# Altium footprint library Miscellaneous Devices.PcbLib: 306 footprints (part 18 of 20)
Each footprint in its own frame and in the unit in brackets; x right, y up, seen from the top. Pads: shape width x height; smd on the part's side, far side on the other; paste and mask are expansions set on the pad; w line width, h text height; cw(c..) or ccw(c..) is an arc to the next point about the centre after c.
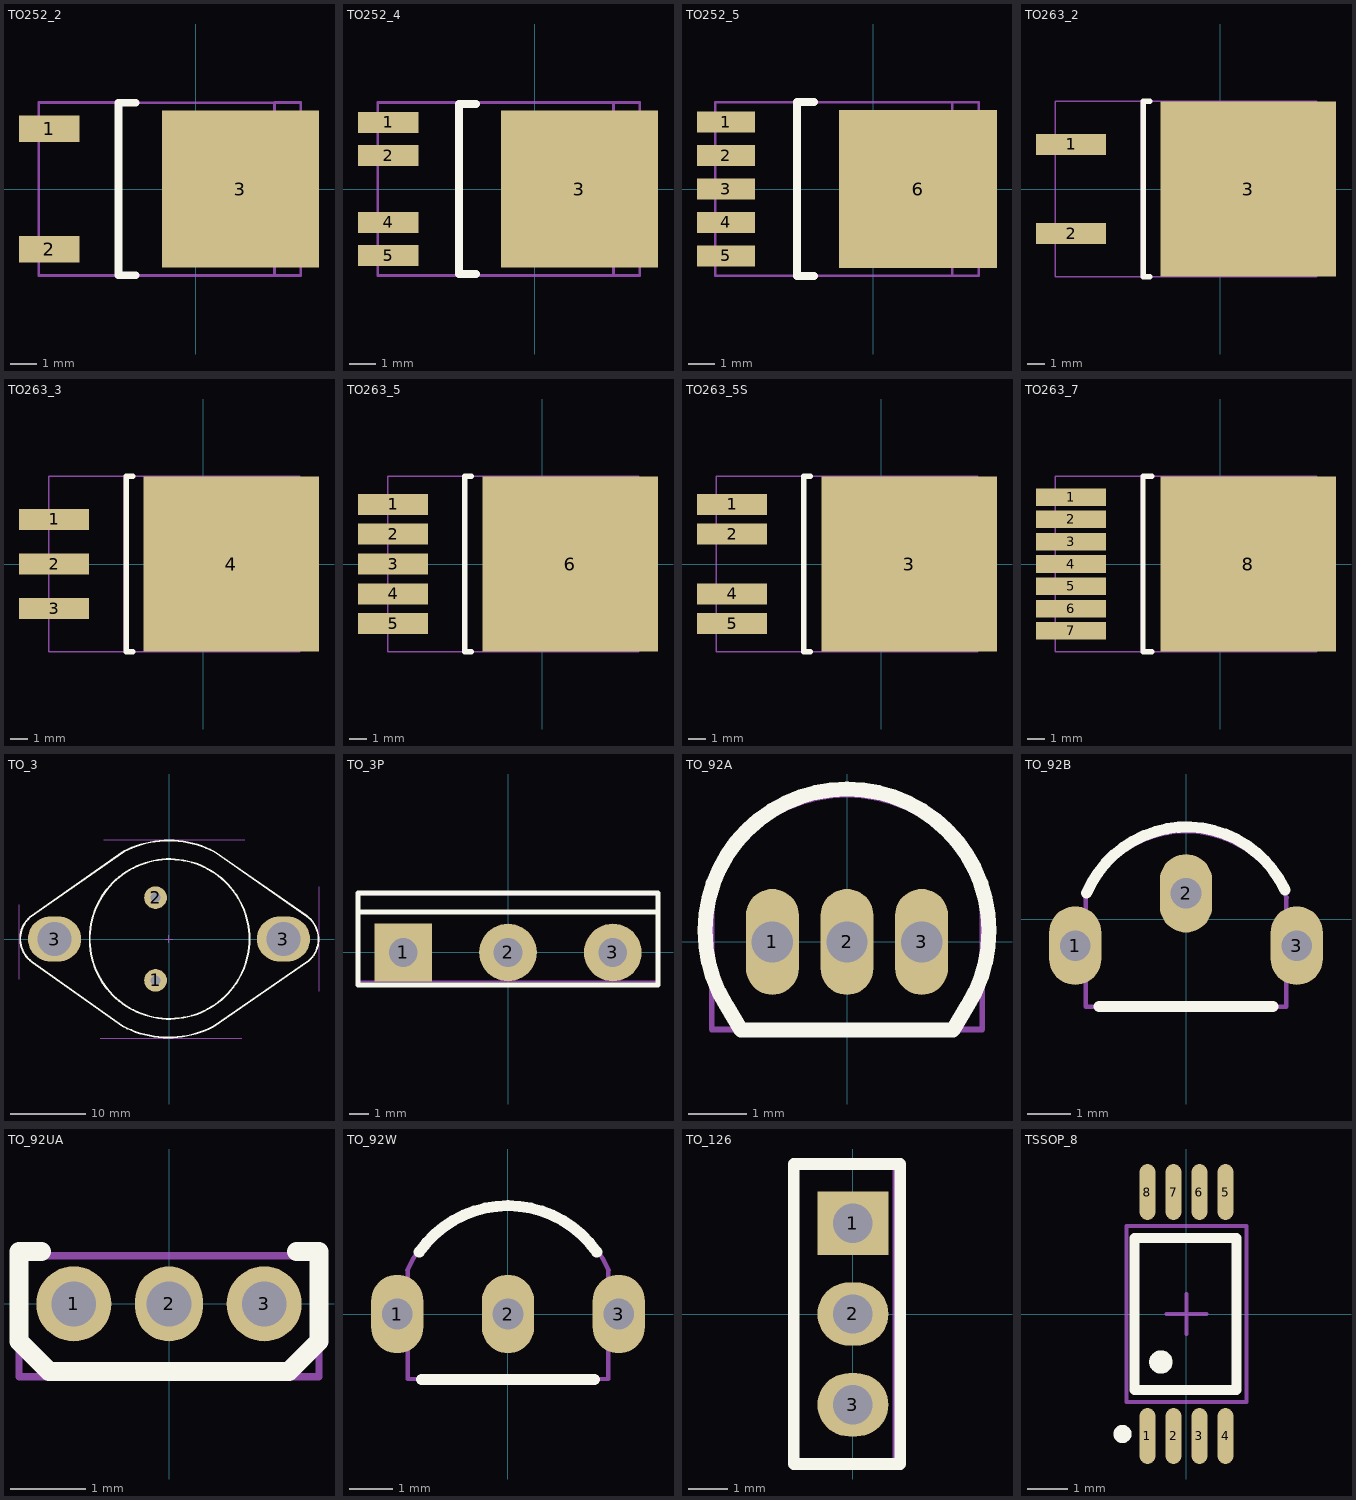
[diagram p17: the footprints below, top view; thin cyan lines are the x and y axes]

## TO252_2 [mm]
pads (3):
  rect 2.3x1 smd: 1(-5.6,2.3) 2(-5.6,-2.3)
  rect 6x6 smd: 3(1.7,0)
Top Overlay:
  lines w0.3: -2.294,-3.29 -2.95,-3.29 -2.95,3.29 -2.294,3.29
Mechanical 15:
  lines w0.1: -3,3.29 3,3.29 ; -3,-3.3 -3,3.3 -6,3.3 -6,-3.3 -3,-3.3 ; -3,-3.3 3,-3.3 ; 3,-3.3 3,3.3 4,3.3 4,-3.3 3,-3.3
3D body: height 2.3, standoff -0.01, extent -5.5,-3.29 4.2,3.29

## TO252_4 [mm]
pads (5):
  rect 2.3x0.8 smd: 1(-5.6,2.54) 2(-5.6,1.27) 4(-5.6,-1.27) 5(-5.6,-2.54)
  rect 6x6 smd: 3(1.7,0)
Top Overlay:
  lines w0.3: -2.25,-3.25 -2.9,-3.25 -2.9,3.25 -2.25,3.25
Mechanical 15:
  lines w0.1: -3,-3.3 -6,-3.3 -6,3.3 -3,3.3 ; -3,-3.3 -3,3.3 ; -3,-3.3 3,-3.3 ; -3,3.3 3,3.3 ; 3,-3.3 3,3.3 ; 3,-3.3 4,-3.3 4,3.3 3,3.3
3D body: height 2.3, standoff -0.01, extent -5.7,-3.249 4.1,3.251

## TO252_5 [mm]
pads (6):
  rect 2.2x0.8 smd: 1(-5.6,2.54) 2(-5.6,1.27) 3(-5.6,0) 4(-5.6,-1.27) 5(-5.6,-2.54)
  rect 6x6 smd: 6(1.7,0)
Top Overlay:
  lines w0.3: -2.25,-3.3 -2.9,-3.3 -2.9,3.3 -2.25,3.3
Mechanical 15:
  lines w0.1: -3,-3.3 -6,-3.3 -6,3.3 -3,3.3 ; -3,-3.3 -3,3.3 ; -3,-3.3 3,-3.3 ; -3,3.3 3,3.3 ; 3,-3.3 4,-3.3 4,3.3 3,3.3 ; 3,-3.3 3,3.3
3D body: height 2.4, standoff -0.01, extent -6.333,-3.353 4.533,3.347

## TO263_2 [mm]
pads (3):
  rect 4x1.2 smd: 1(-8.5,2.54) 2(-8.5,-2.54)
  rect 10x10 smd: 3(1.6,0)
Top Overlay:
  lines w0.3: -4.006,-5 -4.387,-5 -4.387,5 -4.006,5
Mechanical 15:
  lines w0.1: -4.5,-5 -9.4,-5 -9.4,5 -4.5,5 ; -4.5,-5 4.5,-5 ; -4.5,-5 -4.5,5 ; -4.5,5 4.5,5 ; 4.5,-5 5.5,-5 5.5,5 4.5,5 ; 4.5,-5 4.5,5
3D body: height 4.98, standoff -0.03, extent -9.4,-5.1 5.864,5.06

## TO263_3 [mm]
pads (4):
  rect 4x1.2 smd: 1(-8.5,2.54) 2(-8.5,0) 3(-8.5,-2.54)
  rect 10x10 smd: 4(1.6,0)
Top Overlay:
  lines w0.3: -4.006,-5 -4.387,-5 -4.387,5 -4.006,5
Mechanical 15:
  lines w0.1: -4.5,-5 -8.8,-5 -8.8,5 -4.5,5 ; -4.5,-5 4.5,-5 ; -4.5,-5 -4.5,5 ; -4.5,5 4.5,5 ; 4.5,-5 5.5,-5 5.5,5 4.5,5 ; 4.5,-5 4.5,5
3D body: height 4.78, standoff -0.02, extent -9.4,-5 6.27,5

## TO263_5 [mm]
pads (6):
  rect 4x1.2 smd: 1(-8.5,3.4) 2(-8.5,1.7) 3(-8.5,0) 4(-8.5,-1.7) 5(-8.5,-3.4)
  rect 10x10 smd: 6(1.6,0)
Top Overlay:
  lines w0.3: -4.029,-5 -4.41,-5 -4.41,5 -4.029,5
Mechanical 15:
  lines w0.1: -4.5,-5 -8.8,-5 -8.8,5 -4.5,5 ; -4.5,-5 4.5,-5 ; -4.5,-5 -4.5,5 ; -4.5,5 4.5,5 ; 4.5,-5 4.5,5 ; 4.5,-5 5.5,-5 5.5,5 4.5,5
3D body: height 4.78, standoff -0.02, extent -9.4,-5 6.27,5

## TO263_5S [mm]
pads (5):
  rect 4x1.2 smd: 1(-8.5,3.4) 2(-8.5,1.7) 4(-8.5,-1.7) 5(-8.5,-3.4)
  rect 10x10 smd: 3(1.6,0)
Top Overlay:
  lines w0.3: -4.029,-5 -4.41,-5 -4.41,5 -4.029,5
Mechanical 15:
  lines w0.1: -4.5,-5 -9.4,-5 -9.4,5 -4.5,5 ; -4.5,-5 4.5,-5 ; -4.5,-5 -4.5,5 ; -4.5,5 4.5,5 ; 4.5,-5 4.5,5 ; 4.5,-5 5.5,-5 5.5,5 4.5,5
3D body: height 4.78, standoff -0.02, extent -9.4,-5 6.27,5

## TO263_7 [mm]
pads (8):
  rect 4x1 smd: 1(-8.5,3.81) 2(-8.5,2.54) 3(-8.5,1.27) 4(-8.5,0) 5(-8.5,-1.27) 6(-8.5,-2.54) 7(-8.5,-3.81)
  rect 10x10 smd: 8(1.6,0)
Top Overlay:
  lines w0.3: -3.9,-5 -4.4,-5 -4.4,5 -3.9,5
Mechanical 15:
  lines w0.1: -4.5,-5 4.5,-5 ; -4.5,-5 -4.5,5 ; -4.5,-5 -9.4,-5 -9.4,5 -4.5,5 ; -4.5,5 4.5,5 ; 4.5,-5 5.5,-5 5.5,5 4.5,5 ; 4.5,-5 4.5,5
3D body: height 4.78, standoff -0.02, extent -9.4,-5 6.27,5

## TO_3 [mm]
pads (4):
  round 3 hole 1.3: 1(-1.778,-5.461) 2(-1.778,5.461)
  oval 7x6 hole 4.5: 3(-15.113,0) 3(15.113,0)
Top Overlay:
  circle w0.254: c0.076,0 r10.541
  lines w0.254: -18.363,2.871 ccw(c-15.833,0.034) -18.081,-3.032 -6.107,-11.513 ccw(c-0.069,-0.003) 5.884,-11.557 18.463,-2.871 ccw(c15.933,-0.034) 18.181,3.032 6.007,11.513 ccw(c-0.031,0.003) -5.984,11.557 -18.363,2.871
Mechanical 15:
  lines w0.1: -19.8,-5.3 -19.8,4.5 ; -9.1,-13.1 9.6,-13.1 ; -8.6,13.1 10,13.1 ; -0.5,0 0.5,0 ; 0,-0.5 0,0.5 ; 19.8,-6.9 19.8,6.9
3D body: height 8.7, standoff -2.8, extent -19.757,-13.089 19.833,13.089

## TO_3P [mm]
pads (3):
  rect 3x3 hole 1.5: 1(-5.45,0)
  round 3 hole 1.5: 2(0,0) 3(5.45,0)
Top Overlay:
  lines w0.254: -7.8,2.1 7.8,2.1 ; -7.8,-1.7 7.8,-1.7 7.8,3.1 -7.8,3.1 -7.8,-1.7
Mechanical 15:
  lines w0.1: -7.8,-1.5 7.8,-1.5 7.8,3 -7.8,3 -7.8,-1.5
3D body: height 24.9, standoff -11, extent -7.75,-1.5 7.75,3

## TO_92A [mm]
pads (3):
  oval 0.9x1.8 hole 0.7: 1(-1.27,0) 2(0,0) 3(1.27,0)
Top Overlay:
  lines w0.254: -2.052,-1.086 cw(c0,0.186) 2.052,-1.086 1.8,-1.5 -1.8,-1.5 -2.052,-1.086
Mechanical 15:
  lines w0.1: -2.3,1 -2.3,-1.49 2.3,-1.49 2.3,1 ; -2.295,0.998 cw(c0,0) 2.295,0.998
3D body: height 7, standoff -4, extent -2.421,-1.49 2.379,2.44

## TO_92B [mm]
pads (3):
  oval 1.2x1.8 hole 0.7: 1(-2.54,-0.6) 2(0,0.6) 3(2.54,-0.6)
Top Overlay:
  lines w0.254: -2.277,0.603 cw(c0.011,-0.363) 2.267,0.677 ; -2,-2 2,-2
Mechanical 15:
  lines w0.1: -2.309,0.504 cw(c0,-0.5) 2.309,0.504 ; -2.3,0.5 -2.3,-2 2.3,-2 2.3,0.5
3D body: height 7.34, standoff -0.7, extent -2.8,-2 2.88,1.8

## TO_92UA [mm]
pads (3):
  round 1 hole 0.6: 1(-1.27,0) 3(1.27,0)
  oval 0.9x1 hole 0.6: 2(0,0)
Top Overlay:
  lines w0.254: -1.7,0.7 -2,0.7 -2,-0.5 -1.6,-0.9 1.6,-0.9 2,-0.5 2,0.7 1.7,0.7
Mechanical 15:
  lines w0.1: -2,-0.97 2,-0.97 2,0.64 -2,0.64 -2,-0.97
3D body: height 5.7, standoff -7.3, extent -2,-0.97 2,0.64

## TO_92W [mm]
pads (3):
  oval 1.2x1.8 hole 0.7: 1(-2.54,0) 2(0,0) 3(2.54,0)
Top Overlay:
  lines w0.254: -2.035,1.425 cw(c0,0) 2.035,1.425 ; -1.98,-1.5 1.98,-1.5
Mechanical 15:
  lines w0.1: -2.309,1.004 cw(c0,0) 2.309,1.004 ; -2.3,1 -2.3,-1.49 2.3,-1.49 2.3,1
3D body: height 6.7, standoff -4.6, extent -2.73,-1.539 2.8,2.539

## TO_126 [mm]
pads (3):
  rect 1.8x1.6 hole 1: 1(0,2.3)
  oval 1.8x1.6 hole 1: 2(0,0) 3(0,-2.3)
Top Overlay:
  lines w0.3: -1.5,-3.8 1.2,-3.8 1.2,3.8 -1.5,3.8 -1.5,-3.8
Mechanical 15:
  lines w0.1: -1.5,-3.8 -1.5,3.8 1.05,3.8 1.05,-3.8 -1.5,-3.8
3D body: height 13.19, standoff -3.54, extent -1.5,-3.8 1.05,3.8

## TSSOP_8 [mm] "0.65"
pads (8):
  oval 0.4x1.4 smd: 1(-0.975,-3.05) 2(-0.325,-3.05) 3(0.325,-3.05) 4(0.975,-3.05) 5(0.975,3.05) 6(0.325,3.05) 7(-0.325,3.05) 8(-0.975,3.05)
Top Overlay:
  circle w0.3: c-0.641,-1.2 r0.141
  circle w0.254: c-1.6,-3 r0.1
  lines w0.254: -1.3,-1.9 1.25,-1.9 1.25,1.9 -1.3,1.9 -1.3,-1.9
Mechanical 15:
  lines w0.1: -0.5,0 0.5,0 ; 0,-0.5 0,0.5 ; -1.5,-2.2 1.5,-2.2 1.5,2.2 -1.5,2.2 -1.5,-2.2
3D body: height 1.2, standoff 0, extent -1.5,-3.2 1.5,3.2